# Altium integrated library Pantalla_ILI9341.IntLib: 1 symbol
Pins are listed as number, name and electrical type; pins without a type are passive.

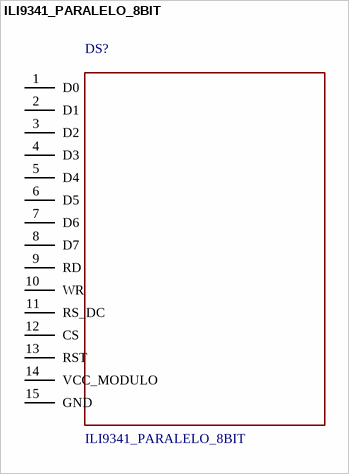
[diagram p0: symbol ILI9341_PARALELO_8BIT]

## ILI9341_PARALELO_8BIT
designator DS?
ILI9341_PARALELO_8BIT - simbolo de conexion sin huella; Carnet: 22993; Curso: Digital 2; Proyecto: proyecto 3; Tipo: Modulo externo; sin huella PCB; Pin numbering: Numeracion logica: verificar etiquetas del modulo; Author: Miguel Donis; Revision: 1.0
pins: 1 D0, 2 D1, 3 D2, 4 D3, 5 D4, 6 D5, 7 D6, 8 D7, 9 RD, 10 WR, 11 RS_DC, 12 CS, 13 RST, 14 VCC_MODULO, 15 GND